# Altium footprint library Crystals Oscillators.PcbLib: 38 footprints (part 1 of 3)
Each footprint in its own frame and in the unit in brackets; x right, y up, seen from the top. Pads: shape width x height; smd on the part's side, far side on the other; paste and mask are expansions set on the pad; w line width, h text height; cw(c..) or ccw(c..) is an arc to the next point about the centre after c.
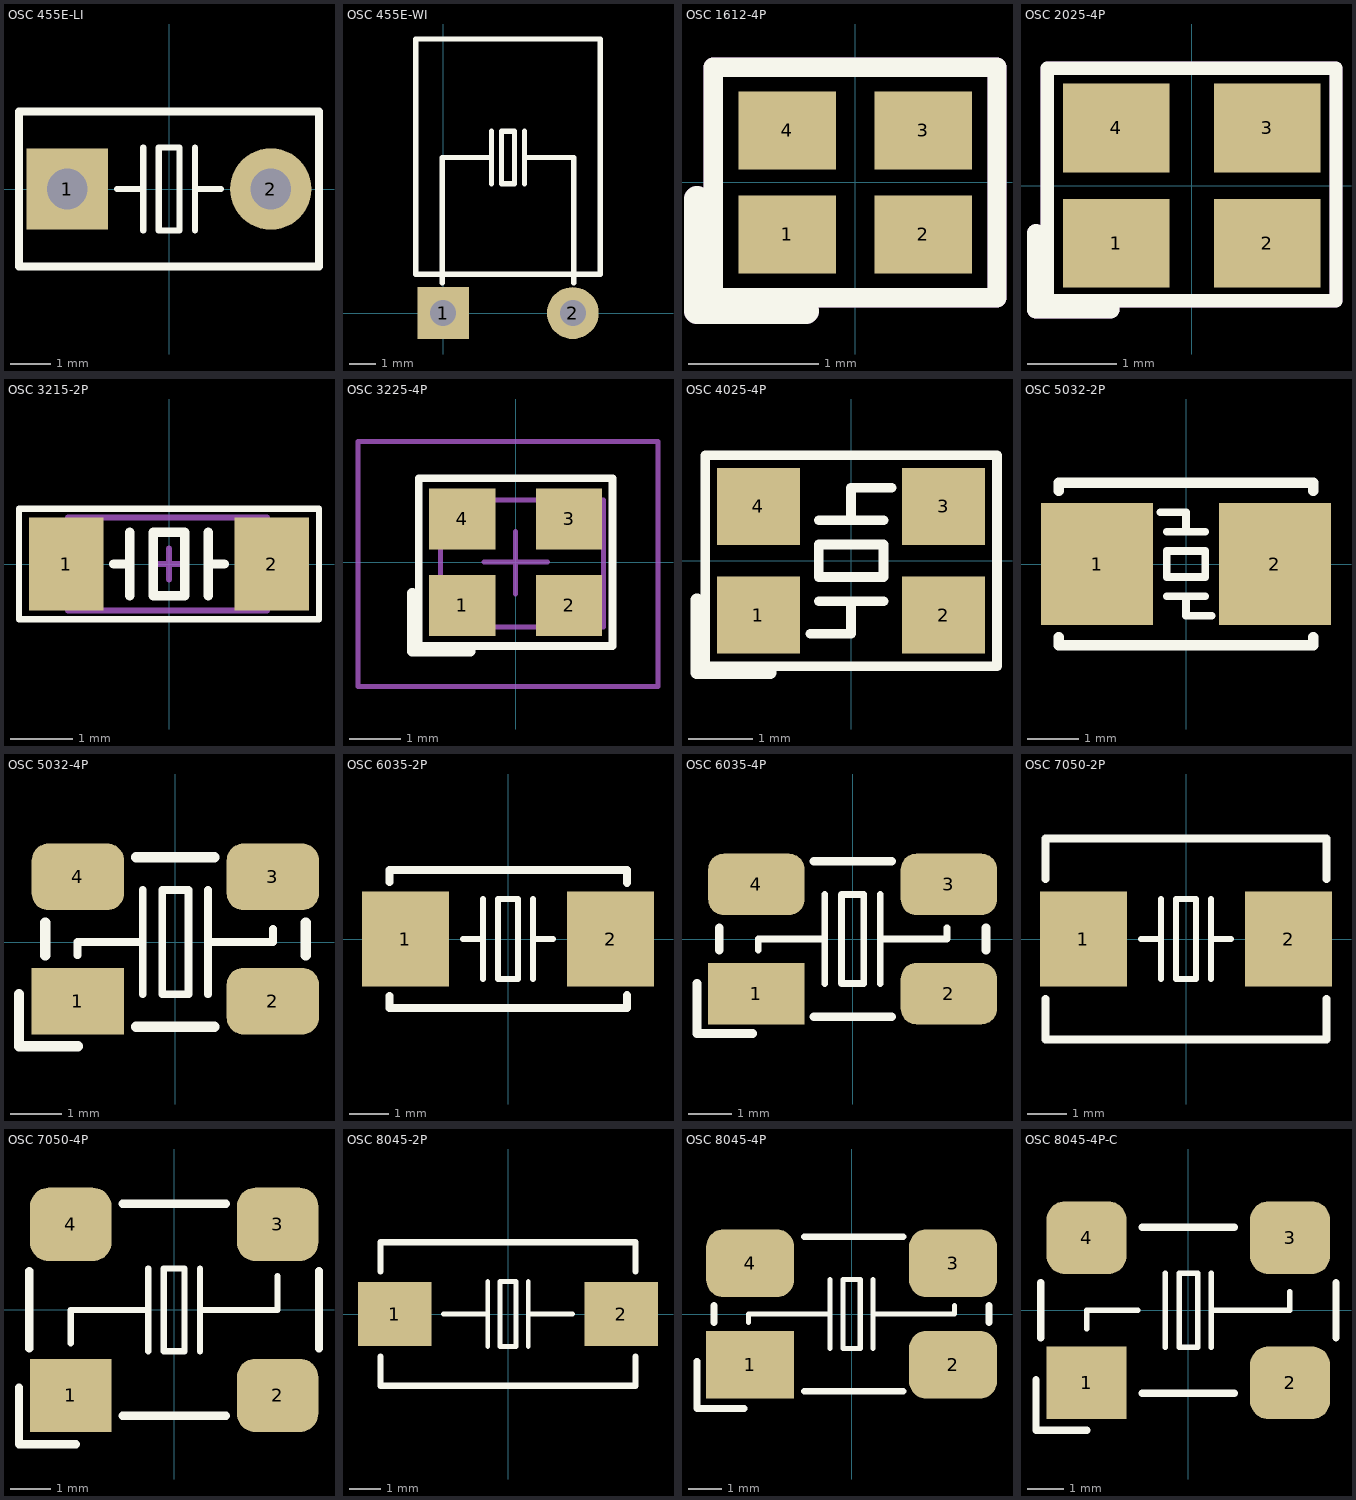
[diagram p0: the footprints below, top view; thin cyan lines are the x and y axes]

## OSC 455E-LI [mm]
pads (2):
  rect 2x2 hole 1 unplated: 1(-2.5,0)
  round 2 hole 1 unplated: 2(2.5,0)
Top Overlay:
  lines w0.152: -1.27,0 -0.635,0 ; -0.635,-1.016 -0.635,1.016 ; 0.635,-1.016 0.635,1.016 ; 0.635,0 1.27,0 ; -0.254,-1.016 0.254,-1.016 0.254,1.016 -0.254,1.016 -0.254,-1.016
  lines w0.203: -3.683,-1.905 -3.683,1.905 3.683,1.905 3.683,-1.905 -3.683,-1.905
3D body "OSC 455E-LI.STEP": height 9.05, standoff -3.45, extent -3.5,-1.722 3.5,1.778

## OSC 455E-WI [mm]
pads (2):
  rect 2x2 hole 1 unplated: 1(0,0)
  round 2 hole 1 unplated: 2(5,0)
Top Overlay:
  lines w0.203: -0.04,1.174 -0.04,1.5 -0.04,6 1.23,6 1.865,6 ; 1.865,4.984 1.865,7.016 ; 3.135,4.984 3.135,7.016 ; 3.135,6 3.77,6 5.04,6 5.04,1.5 5.04,1.174 ; -1.056,1.5 -1.056,10.572 6.056,10.572 6.056,1.5 -1.056,1.5 ; 2.246,4.984 2.754,4.984 2.754,7.016 2.246,7.016 2.246,4.984
3D body "OSC 455E-WI.STEP": height 3.65, standoff -3.45, extent -0.98,-0.258 6.02,10.342

## OSC 1612-4P [mm]
pads (4):
  rect 0.75x0.6 smd: 1(-0.525,-0.4) 2(0.525,-0.4) 3(0.525,0.4) 4(-0.525,0.4)
Top Overlay:
  lines w0.15: -1.092,-0.889 1.092,-0.889 1.092,0.889 -1.092,0.889 -1.092,-0.889
  lines w0.2: -1.219,-0.991 -0.381,-0.991 ; -1.219,-0.965 -1.219,-0.127
Bottom Courtyard:
  lines w0.15: -1.092,-0.889 1.092,-0.889 1.092,0.889 -1.092,0.889 -1.092,-0.889
  lines w0.2: -1.219,-0.991 -0.381,-0.991 ; -1.219,-0.965 -1.219,-0.127
  text "'.Designator'" at -1.45,-0.175 h0.51
3D body "OSC 1612-4P.STEP": height 0.35, standoff -0.02, extent -0.8,-0.635 0.8,0.565

## OSC 2025-4P [mm]
pads (4):
  rect 1.2x1 smd: 1(-0.85,-0.65) 2(0.85,-0.65) 3(0.85,0.65) 4(-0.85,0.65)
Top Overlay:
  lines w0.15: -1.626,-1.295 1.626,-1.295 1.626,1.321 -1.626,1.321 -1.626,-1.295
  lines w0.2: -1.753,-1.397 -0.914,-1.397 ; -1.753,-1.372 -1.753,-0.533
Bottom Courtyard:
  lines w0.15: -1.626,-1.295 1.626,-1.295 1.626,1.321 -1.626,1.321 -1.626,-1.295
  lines w0.2: -1.753,-1.397 -0.914,-1.397 ; -1.753,-1.372 -1.753,-0.533
  text "'.Designator'" at -2.15,-0.3 h0.76
3D body "OSC 2025-4P.STEP": height 0.55, standoff -0.02, extent -1.27,-1 1.23,1

## OSC 3215-2P [mm]
pads (2):
  rect 1.2x1.5 smd: 1(-1.65,0) 2(1.65,0)
Top Overlay:
  lines w0.1: -2.413,-0.889 2.413,-0.889 2.413,0.889 -2.413,0.889 -2.413,-0.889
  lines w0.152: -0.889,0 -0.635,0 ; -0.635,-0.508 -0.635,0.508 ; 0.635,-0.508 0.635,0.508 ; 0.635,0 0.889,0 ; -0.254,-0.508 -0.254,0.508 0.254,0.508 0.254,-0.508 -0.254,-0.508
Top Component Outline:
  lines w0.1: -1.625,-0.75 -1.625,0.75 1.575,0.75 1.575,-0.75 -1.625,-0.75
Top Component Center:
  lines w0.1: -0.225,0 0.225,0 ; 0,-0.25 0,0.25
Top Value:
  text "'.Comment'" at -2.476,-0.342 h1.02
Top Designator:
  text "'.Designator'" at -3.28,-0.446 h1.14
3D body "OSC 3215-2P.STEP": height 0.61, standoff -0.01, extent -1.625,-0.75 1.575,0.75

## OSC 3225-4P [mm]
pads (4):
  rect 1.3x1.2 smd: 1(-1.05,-0.85) 2(1.05,-0.85) 3(1.05,0.85) 4(-1.05,0.85)
Top Overlay:
  lines w0.15: -1.905,-1.651 1.905,-1.651 1.905,1.651 -1.905,1.651 -1.905,-1.651
  lines w0.2: -2.032,-1.753 -0.889,-1.753 ; -2.032,-1.727 -2.032,-0.61
Top Component Outline:
  lines w0.1: -1.475,-1.275 -1.475,1.225 1.725,1.225 1.725,-1.275 -1.475,-1.275
Top Component Center:
  lines w0.1: -0.25,0 0.25,0 ; 0,-0.25 0,0.25
Top Value:
  text "'.Comment'" at -2.202,-0.304 h1.02
Top Designator:
  text "'.Designator'" at -3.28,-0.446 h1.14
Top Courtyard:
  lines w0.1: -0.625,0 0.625,0 ; 0,-0.625 0,0.6 ; -3.1,-2.45 -3.1,2.375 2.8,2.375 2.8,-2.45 -3.1,-2.45
3D body "OSC 3225-4P.STEP": height 0.7, standoff -0.02, extent -1.473,-1.27 1.727,1.23

## OSC 4025-4P [mm]
pads (4):
  rect 1.3x1.2 smd: 1(-1.45,-0.85) 2(1.45,-0.85) 3(1.45,0.85) 4(-1.45,0.85)
Top Overlay:
  lines w0.15: -2.286,-1.651 2.286,-1.651 2.286,1.651 -2.286,1.651 -2.286,-1.651
  lines w0.152: -0.635,-1.143 0,-1.143 0,-0.635 ; -0.508,-0.635 0.508,-0.635 ; -0.508,0.635 0.508,0.635 ; 0,0.635 0,1.143 0.635,1.143 ; -0.508,-0.254 0.508,-0.254 0.508,0.254 -0.508,0.254 -0.508,-0.254
  lines w0.2: -2.413,-1.753 -1.27,-1.753 ; -2.413,-1.727 -2.413,-0.61
3D body "OSC 4025-4P.STEP": height 0.7, standoff -0.02, extent -2,-1.27 2,1.23

## OSC 5032-2P [mm]
pads (2):
  rect 2.2x2.4 smd: 1(-1.75,0) 2(1.75,0)
Top Overlay:
  lines w0.152: -0.508,1.016 0,1.016 0,0.635 ; -0.381,-0.635 0.381,-0.635 ; -0.381,0.635 0.381,0.635 ; 0,-0.635 0,-1.016 0.381,-1.016 0.508,-1.016 ; -0.381,-0.254 0.381,-0.254 0.381,0.254 -0.381,0.254 -0.381,-0.254
  lines w0.203: -2.5,-1.437 -2.5,-1.6 2.5,-1.6 2.5,-1.437 ; -2.5,1.437 -2.5,1.6 2.5,1.6 2.5,1.437
3D body "OSC 5032-2P.STEP": height 0.86, standoff 0.04, extent -2.5,-1.524 2.5,1.676

## OSC 5032-4P [mm]
pads (4):
  rect 1.8x1.3 smd: 1(-1.9,-1.15)
  rrect50% 1.8x1.3 smd: 2(1.9,-1.15) 3(1.9,1.272) 4(-1.9,1.272)
Top Overlay:
  lines w0.152: -1.905,-0.254 -1.905,0 -1.397,0 -0.635,0 ; -0.635,-1.016 -0.635,1.016 ; 0.635,-1.016 0.635,1.016 ; 0.635,0 1.397,0 1.905,0 1.905,0.254 ; -0.254,-1.016 -0.254,1.016 0.254,1.016 0.254,-1.016 -0.254,-1.016
  lines w0.203: -3.048,-1.016 -3.048,-2.032 -1.905,-2.032 ; -2.54,-0.254 -2.54,0.381 ; -0.762,-1.651 0.762,-1.651 ; -0.762,1.651 0.762,1.651 ; 2.54,-0.254 2.54,0.381
3D body "OSC 5032-4P.STEP": height 0.86, standoff 0.03, extent -2.5,-1.651 2.5,1.549

## OSC 6035-2P [mm]
pads (2):
  rect 2.2x2.4 smd: 1(-2.6,0) 2(2.6,0)
Top Overlay:
  lines w0.152: -1.143,0 -0.635,0 ; -0.635,-1.016 -0.635,1.016 ; 0.635,-1.016 0.635,1.016 ; 0.635,0 1.143,0 ; -0.254,-1.016 0.254,-1.016 0.254,1.016 -0.254,1.016 -0.254,-1.016
  lines w0.203: -3,-1.445 -3,-1.75 3.02,-1.75 3.02,-1.425 ; -3,1.445 -3,1.75 3.02,1.75 3.02,1.425
3D body "OSC 6035-2P.STEP": height 1.06, standoff 0.04, extent -3,-1.651 3,1.849

## OSC 6035-4P [mm]
pads (4):
  rect 2.2x1.4 smd: 1(-2.2,-1.25)
  rrect50% 2.2x1.4 smd: 2(2.2,-1.25) 3(2.2,1.25) 4(-2.2,1.25)
Top Overlay:
  lines w0.152: -2.159,-0.254 -2.159,0 -1.397,0 -0.635,0 ; -0.635,-1.016 -0.635,1.016 ; 0.635,-1.016 0.635,1.016 ; 0.635,0 1.397,0 2.159,0 2.159,0.254 ; -0.254,-1.016 -0.254,1.016 0.254,1.016 0.254,-1.016 -0.254,-1.016
  lines w0.203: -3.556,-1.016 -3.556,-2.159 -2.286,-2.159 ; -3.048,-0.254 -3.048,0.254 ; -0.889,-1.778 0.889,-1.778 ; -0.889,1.778 0.889,1.778 ; 3.048,-0.254 3.048,0.254
3D body "OSC 6035-4P.STEP": height 1.06, standoff 0.03, extent -3,-1.905 3,1.595

## OSC 7050-2P [mm]
pads (2):
  rect 2.2x2.4 smd: 1(-2.6,0) 2(2.6,0)
Top Overlay:
  lines w0.152: -1.143,0 -0.635,0 ; -0.635,-1.016 -0.635,1.016 ; 0.635,-1.016 0.635,1.016 ; 0.635,0 1.143,0 ; -0.254,-1.016 -0.254,1.016 0.254,1.016 0.254,-1.016 -0.254,-1.016
  lines w0.203: -3.556,-1.524 -3.556,-2.54 3.556,-2.54 3.556,-1.524 ; -3.556,1.524 -3.556,2.54 3.556,2.54 3.556,1.524
3D body "OSC 7050-2P.STEP": height 1.36, standoff 0.04, extent -3.373,-2.46 3.627,2.54

## OSC 7050-4P [mm]
pads (4):
  rect 2x1.8 smd: 1(-2.54,-2.1)
  rrect50% 2x1.8 smd: 2(2.54,-2.1) 3(2.54,2.1) 4(-2.54,2.1)
Top Overlay:
  lines w0.152: -2.54,-0.821 -2.54,0 -1.397,0 -0.635,0 ; -0.635,-1.016 -0.635,1.016 ; 0.635,-1.016 0.635,1.016 ; 0.635,0 1.397,0 2.54,0 2.54,0.83 ; -0.254,-1.016 -0.254,1.016 0.254,1.016 0.254,-1.016 -0.254,-1.016
  lines w0.203: -3.81,-1.905 -3.81,-3.302 -2.413,-3.302 ; -3.556,-0.948 -3.556,0.957 ; -1.27,-2.599 1.27,-2.599 ; -1.27,2.608 1.27,2.608 ; 3.556,-0.948 3.556,0.957
3D body "OSC 7050-4P.STEP": height 1.36, standoff 0.04, extent -3.5,-2.667 3.5,2.333

## OSC 8045-2P [mm]
pads (2):
  rect 2.3x2 smd: 1(-3.556,0) 2(3.556,0)
Top Overlay:
  lines w0.152: -2.032,0 -0.635,0 ; -0.635,-1.016 -0.635,1.016 ; 0.635,-1.016 0.635,1.016 ; 0.635,0 2.032,0 ; -0.254,-1.016 0.254,-1.016 0.254,1.016 -0.254,1.016 -0.254,-1.016
  lines w0.203: -4,-1.334 -4,-2.25 4,-2.25 4,-1.334 ; -4,1.334 -4,2.25 4,2.25 4,1.334
3D body "OSC 8045-2P.STEP": height 1.85, standoff 0.04, extent -4,-2.341 4,2.159

## OSC 8045-4P [mm]
pads (4):
  rect 2.6x2 smd: 1(-3,-1.5)
  rrect50% 2.6x2 smd: 2(3,-1.5) 3(3,1.5) 4(-3,1.5)
Top Overlay:
  lines w0.152: -3.048,-0.254 -3.048,0 -1.397,0 -0.635,0 ; -0.635,-1.016 -0.635,1.016 ; 0.635,-1.016 0.635,1.016 ; 0.635,0 1.397,0 3.048,0 3.048,0.254 ; -0.254,-1.016 -0.254,1.016 0.254,1.016 0.254,-1.016 -0.254,-1.016
  lines w0.203: -4.572,-1.397 -4.572,-2.794 -3.175,-2.794 ; -4.064,-0.254 -4.064,0.254 ; -1.397,-2.286 1.524,-2.286 ; -1.397,2.286 1.524,2.286 ; 4.064,-0.254 4.064,0.254
3D body "OSC 8045-4P.STEP": height 1.66, standoff 0.03, extent -4.127,-2.413 3.873,2.087

## OSC 8045-4P-C [mm]
pads (4):
  rect 2.2x2 smd: 1(-2.8,-1.996)
  rrect50% 2.2x2 smd: 2(2.8,-1.996) 3(2.8,1.996) 4(-2.8,1.996)
Top Overlay:
  lines w0.152: -2.794,-0.508 -2.794,0 -1.397,0 ; -0.635,-1.016 -0.635,1.016 ; 0.635,-1.016 0.635,1.016 ; 0.635,0 1.397,0 2.794,0 2.794,0.508 ; -0.254,-1.016 0.254,-1.016 0.254,1.016 -0.254,1.016 -0.254,-1.016
  lines w0.203: -4.191,-1.905 -4.191,-3.302 -2.794,-3.302 ; -4.064,-0.762 -4.064,0.762 ; -1.27,-2.286 1.27,-2.286 ; -1.27,2.286 1.27,2.286 ; 4.064,-0.762 4.064,0.762
3D body "OSC 8045-4P-C.STEP": height 2.05, standoff 0.04, extent -4.127,-2.54 3.873,1.96